# Altium schematic symbol library Schlib1.SchLib: 1 symbol
Pins are listed as number, name and electrical type; pins without a type are passive.

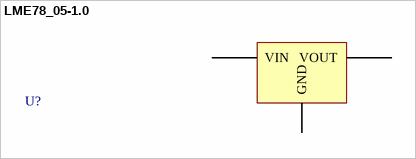
[diagram p0: symbol LME78_05-1.0]

## LME78_05-1.0
designator U?
NON-ISOLATED POL MODULE DC DC CO
pins: 3 VIN, 4 VOUT, 5 GND